# Altium schematic symbol library GRM32EC80J107ME20L.SchLib: 1 symbol
Pins are listed as number, name and electrical type; pins without a type are passive.

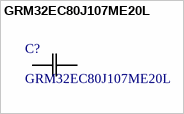
[diagram p0: symbol GRM32EC80J107ME20L]

## GRM32EC80J107ME20L
designator C?
Description; Manufacturer_Name: Murata; Copyright: Copyright (C) 2025 Ultra Librarian. All rights reserved.; Manufacturer_Part_Number: GRM32EC80J107ME20L
footprint G-32_MUR
pins: 1, 2